# Altium footprint library Connectors.PcbLib: 305 footprints (part 14 of 20)
Each footprint in its own frame and in the unit in brackets; x right, y up, seen from the top. Pads: shape width x height; smd on the part's side, far side on the other; paste and mask are expansions set on the pad; w line width, h text height; cw(c..) or ccw(c..) is an arc to the next point about the centre after c.
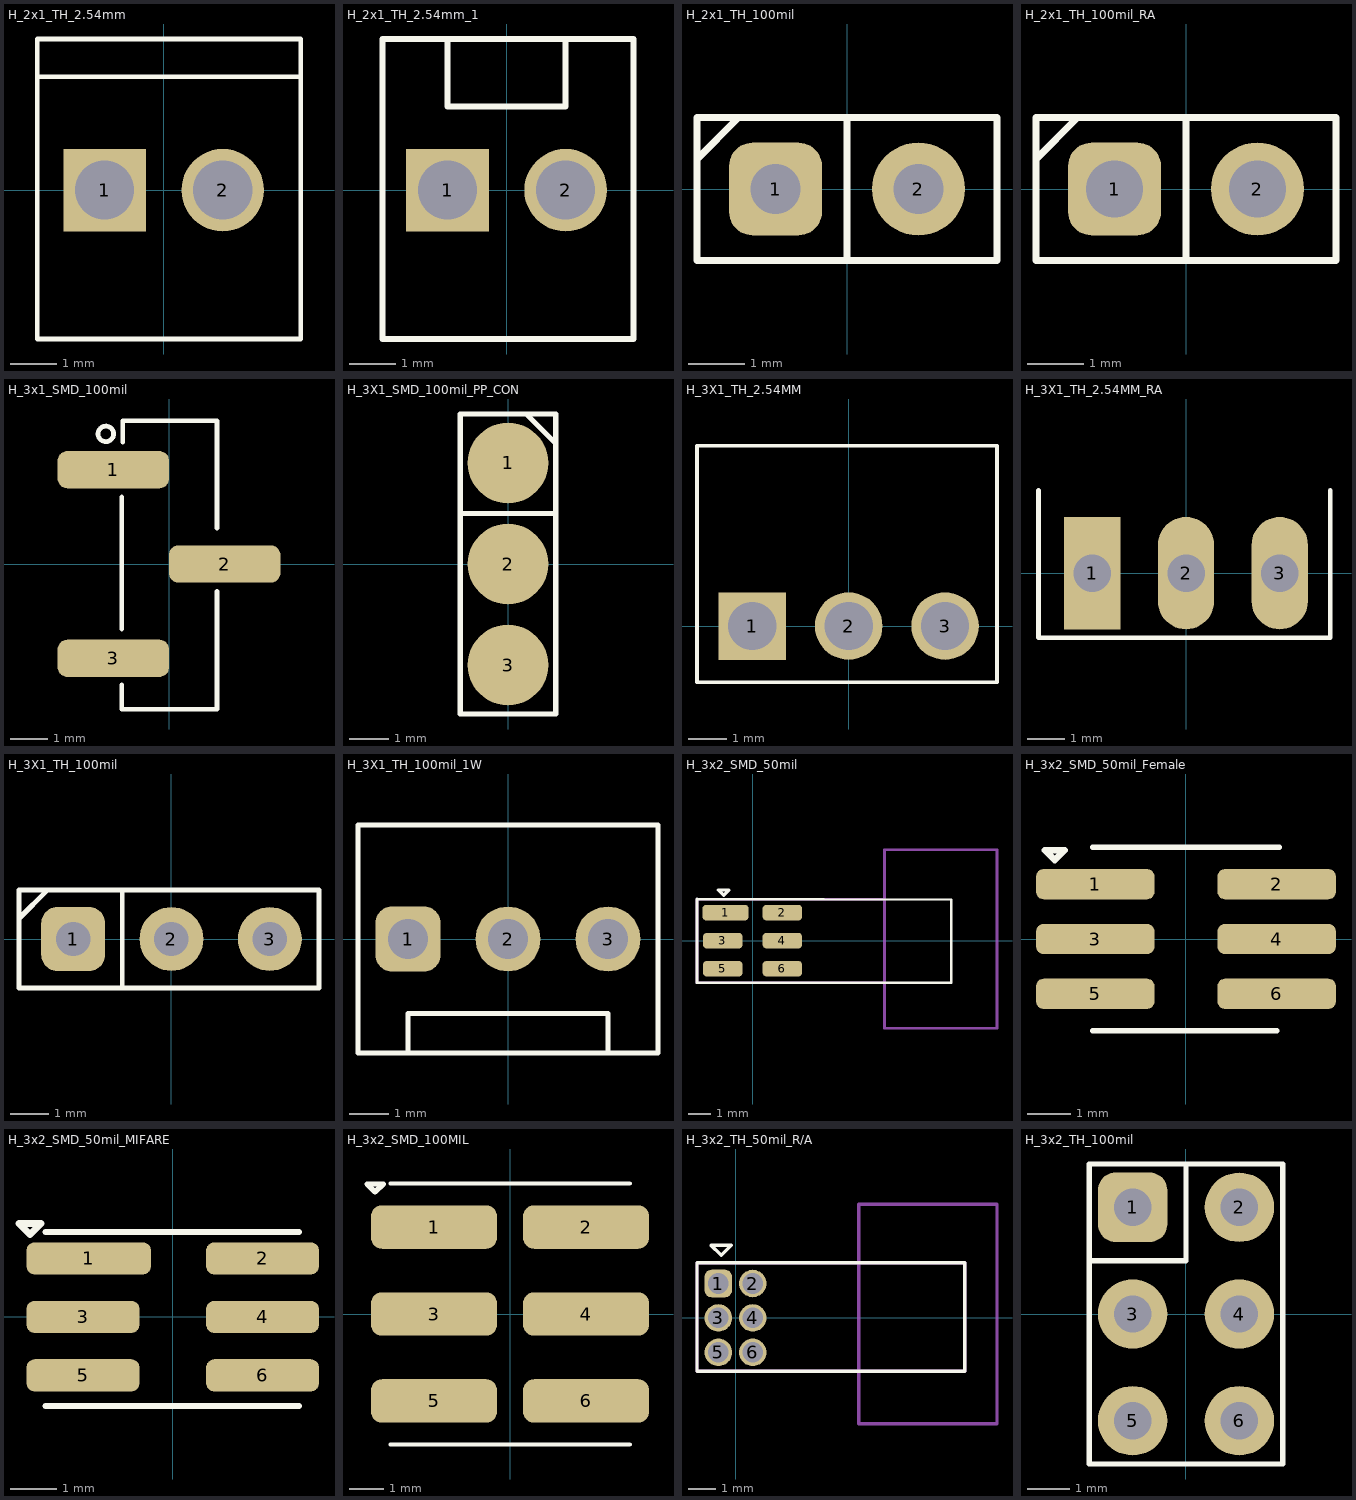
[diagram p13: the footprints below, top view; thin cyan lines are the x and y axes]

## H_2x1_TH_2.54mm [mil] "/ 20200520 / J-E.Pachon"
pads (2):
  rect 70x70 hole 50: 1(-50,0)
  round 70 hole 50: 2(50,0)
Top Overlay:
  lines w3.94: -107,96 114,96 ; -107,-126 -107,128 116,128 116,-126 -107,-126
3D body "022232021.stp": height 395.5, standoff -164.5, extent -95.12,-127.08 98.88,122.92

## H_2x1_TH_2.54mm_1 [mil] "/ 20220804 / J-E.Pachon"
pads (2):
  rect 70x70 hole 50: 1(-50,0)
  round 70 hole 50: 2(50,0)
Top Overlay:
  lines w5: -50,128 -50,70.87 50,70.87 50,128 ; -105.12,-126 -105.12,128 107.48,128 107.48,-126 -105.12,-126
3D body "022272021.stp": height 461.13, standoff -139.65, extent -98.81,-114.17 101.19,114.18

## H_2x1_TH_100mil [mil] "/ 20190222 / C-A.Serna.A"
pads (2):
  rrect50% 65x65 hole 35: 1(-50,0)
  round 65 hole 35: 2(50,0)
Top Overlay:
  lines w5: -105,20.87 -75.87,50 ; 0,-50 0,50 ; -105,-50 105,-50 105,50 -105,50 -105,-50

## H_2x1_TH_100mil_RA [mil] "/ 20190515/ V-A.Patino"
pads (2):
  rrect50% 65x65 hole 40: 1(-50,0)
  round 65 hole 40: 2(50,0)
Top Overlay:
  lines w5: -105,20.87 -75.87,50 ; 0,-50 0,50 ; -105,-50 105,-50 105,50 -105,50 -105,-50
3D body "022289020.stp": height 98.5, standoff -134.5, extent -100.4,-22.12 99.6,402.38

## H_3x1_SMD_100mil [mm] "/ 20190222 / C-A.Serna.A"
pads (3):
  rrect50% 3x1 smd: 1(-1.5,2.54) 2(1.5,0) 3(-1.5,-2.54)
Top Overlay:
  circle w0.127: c-1.702,3.505 r0.209
  lines w0.127: -1.27,-3.912 -1.27,-3.251 ; -1.27,-1.753 -1.27,1.803 ; -1.245,-3.912 1.295,-3.912 1.295,-0.737 ; -1.245,3.277 -1.245,3.861 1.295,3.861 1.295,0.965

## H_3X1_SMD_100mil_PP_CON [mil] "/ 20190222 / C-A.Serna.A"
pads (3):
  round 80 smd: 1(0,100) 2(0,0) 3(0,-100)
Top Overlay:
  lines w5: -47.24,50 47.24,50 ; 18.11,148.43 47.24,119.29 ; -47.24,-148.43 -47.24,148.43 47.24,148.43 47.24,-148.43 -47.24,-148.43

## H_3X1_TH_2.54MM [mil] "/20210218/J-E.Pachon"
pads (3):
  rect 70x70 hole 50: 1(-100,0)
  round 70 hole 50: 2(0,0) 3(100,0)
Top Overlay:
  lines w3.94: -157.39,-58.27 -157.39,187.01 153.94,187.01 153.94,-58.27 -157.39,-58.27
3D body "022289033.stp": height 98.5, standoff -134.5, extent -152.36,-22.51 147.64,481.99

## H_3X1_TH_2.54MM_RA [mil] "/20210826/N-A.Potosi"
pads (3):
  rect 60x120 hole 40: 1(-100,0)
  oval 60x120 / inner round 0 / far side oval 60x120 hole 40: 2(0,0) 3(100,0)
Top Overlay:
  lines w5: -157.39,88.48 -157.39,-69 153.94,-69 153.94,88.48
3D body "022289033.stp": height 98.5, standoff -134.5, extent -152.36,-22.51 147.64,481.99

## H_3X1_TH_100mil [mil] "/ 20221228 / J-A.Sepulveda"
pads (3):
  rrect50% 65x65 hole 35: 1(-100,0)
  round 65 hole 35: 2(0,0) 3(100,0)
Top Overlay:
  lines w5: -155,20.87 -125.87,50 ; -50,-50 -50,50 ; -155,-50 -155,50 150,50 150,-50 -155,-50
3D body "5-146278-3--3DModel-STEP-1.STEP": height 320.5, standoff -119.5, extent -142,-46 142,46

## H_3X1_TH_100mil_1W [mil] "/20200319/C-A.Serna.A"
pads (3):
  rrect50% 65x65 hole 40: 1(-100,0)
  round 65 hole 40: 2(0,0) 3(100,0)
Top Overlay:
  lines w5: 100,-114.17 100,-74.63 -100,-74.63 -100,-114.17 -150.01,-114.17 ; -150.01,-114.17 -150.01,114.17 149.99,114.17 149.99,-114.17 -150.01,-114.17
3D body "022272031.stp": height 461.13, standoff -139.65, extent -150.01,-114.17 149.99,114.17

## H_3x2_SMD_50mil [mm] "/ 202000406/ C-A.Serna.A"
pads (6):
  rrect50% 2.1x0.7 smd: 1(-1.225,1.27)
  rrect50% 1.8x0.7 smd: 2(1.35,1.27) 3(-1.35,0) 4(1.35,0) 5(-1.35,-1.27) 6(1.35,-1.27)
Top Overlay:
  lines w0.127: -2.52,-1.905 -2.52,1.894 9.01,1.858 9.01,-1.905 -2.52,-1.905
  lines w0.152: -1.549,2.298 -1.309,2.058 -1.069,2.298 -1.549,2.298
Mechanical 15:
  lines w0.127: 11.08,-1.783 11.08,2.027 ; -2.52,-1.905 -2.52,1.894 5.98,1.868 5.98,-1.905 -2.52,-1.905 ; 5.98,-3.974 5.98,4.126 11.08,4.126 11.08,-3.974 5.98,-3.974
3D body "FTSH-103-01-L-DH.stp": height 3.44, standoff 0.01, extent -1.914,-1.875 8.982,1.935
3D body "J202_3X2_Female-header.step": height 4.34, standoff 0.24, extent 5.98,-3.974 11.08,4.126

## H_3x2_SMD_50mil_Female [mm] "/ 20201015 / C-D Viveros"
pads (6):
  rrect50% 2.75x0.7 smd: 1(-2.1,1.27) 2(2.1,1.27) 3(-2.1,0) 4(2.1,0) 5(-2.1,-1.27) 6(2.1,-1.27)
Top Overlay:
  lines w0.127: -2.159,-2.121 2.1,-2.121 ; -2.159,2.121 2.159,2.121
  lines w0.152: -3.271,2.059 -3.042,1.83 -2.812,2.059 -3.271,2.059
3D body "CLP-103-02-F-D.stp": height 2.3, standoff 0.01, extent -2.159,-2.121 2.159,2.121

## H_3x2_SMD_50mil_MIFARE [mm] "/ 20190222 / C-A.Serna.A"
pads (6):
  rrect50% 2.7x0.7 smd: 1(-1.825,1.27)
  rrect50% 2.45x0.7 smd: 2(1.95,1.27) 3(-1.95,0) 4(1.95,0) 5(-1.95,-1.27) 6(1.95,-1.27)
Top Overlay:
  lines w0.127: -2.762,-1.937 2.738,-1.937 ; -2.762,1.844 2.738,1.844
  lines w0.152: -3.34,2.03 -2.86,2.03 -3.1,1.79 -3.34,2.03
3D body "20021121-00006XXLFc.stp": height 4.5, standoff 0, extent -2.762,-1.937 2.738,1.873

## H_3x2_SMD_100MIL [mm] "/ 20191030 / C-D.Viveros"
pads (6):
  rrect50% 3.68x1.27 smd: 1(-2.22,2.54) 2(2.22,2.54) 3(-2.22,0) 4(2.22,0) 5(-2.22,-2.54) 6(2.22,-2.54)
Top Overlay:
  lines w0.127: -3.492,-3.81 3.493,-3.81 ; -3.492,3.81 3.493,3.81
  lines w0.152: -4.18,3.8 -3.94,3.56 -3.7,3.8 -4.18,3.8
3D body "015910060.stp": height 9.66, standoff 0.01, extent -3.492,-3.81 3.493,3.81

## H_3x2_TH_50mil_R/A [mil] "/ 20200416/ C-A.Serna.A"
pads (6):
  rrect50% 40x40 hole 30 unplated: 1(-25,50)
  round 40 hole 30 unplated: 2(25,50) 3(-25,0) 4(25,0) 5(-25,-50) 6(25,-50)
Top Overlay:
  lines w5: -56,-77.48 332.92,-77.48 332.92,80.39 -56,80.39 -56,-77.48 ; -35.63,105.72 -6.34,105.72 -20.99,91.08 -35.63,105.72
Mechanical 15:
  lines w5: -56,-77.48 -56,80.39 332.92,80.39 332.92,-77.48 -56,-77.48 ; 179.1,-153.74 179.1,165.15 379.88,165.15 379.88,-153.74 179.1,-153.74
3D body "J202_3X2_Female-header.step": height 169.29, standoff 7.87, extent 179.1,-153.74 379.88,165.15
3D body "J707.step": height 128.44, standoff -115.27, extent -34,-77.48 332.92,80.39

## H_3x2_TH_100mil [mil] "/ 20190222 / C-A.Serna.A"
pads (6):
  rrect50% 65x65 hole 35: 1(-50,100)
  round 65 hole 35: 2(50,100) 3(-50,0) 4(50,0) 5(-50,-100) 6(50,-100)
Top Overlay:
  lines w5: -90.55,50 0,50 0,140.55 ; -90.55,-140.55 90.55,-140.55 90.55,140.55 -90.55,140.55 -90.55,-140.55